# Altium footprint library S_S.PcbLib: 51 footprints (part 4 of 4)
Each footprint in its own frame and in the unit in brackets; x right, y up, seen from the top. Pads: shape width x height; smd on the part's side, far side on the other; paste and mask are expansions set on the pad; w line width, h text height; cw(c..) or ccw(c..) is an arc to the next point about the centre after c.
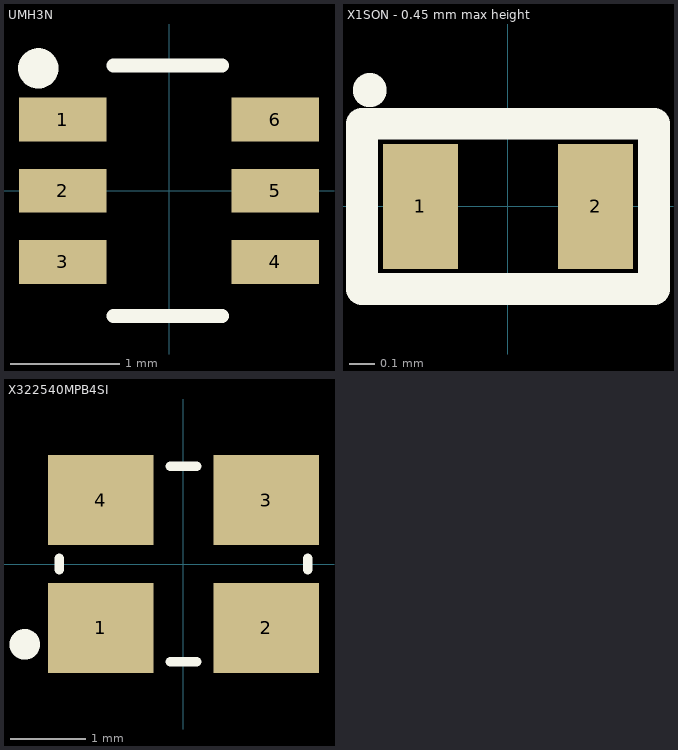
[diagram p3: the footprints below, top view; thin cyan lines are the x and y axes]

## UMH3N [mm]
pads (6):
  rect 0.8x0.4 smd: 1(-0.97,0.65) 2(-0.97,0) 3(-0.97,-0.65) 4(0.97,-0.65) 5(0.97,0) 6(0.97,0.65)
Top Overlay:
  circle w0.254: c-1.194,1.118 r0.057
  lines w0.127: -0.508,-1.143 0.483,-1.143 ; -0.508,1.143 0.483,1.143
3D body "User Library-SOT363-2.STEP": height 1.08, standoff -0.02, extent -1.2,-1.1 1.2,1.1

## X1SON - 0.45 mm max height [mm] "TVS 6A@80/20µs 14V 6V 5.5V@(MAX)"
pads (2):
  rect 0.3x0.5 smd: 1(-0.35,0) 2(0.35,0)
Top Overlay:
  circle w0.127: c-0.553,0.465 r0.004
  lines w0.127: -0.584,-0.33 -0.584,0.33 0.584,0.33 0.584,-0.33 -0.584,-0.33
3D body "TPD1E10B06DPYR.STEP": height 0.45, standoff 0, extent -0.5,-0.3 0.5,0.3

## X322540MPB4SI [mm]
pads (4):
  rect 1.4x1.2 smd: 1(-1.1,-0.85) 2(1.1,-0.85) 3(1.1,0.85) 4(-1.1,0.85)
Top Overlay:
  circle w0.254: c-2.108,-1.067 r0.076
  lines w0.127: -1.651,-0.076 -1.651,0.076 ; -0.178,-1.295 0.178,-1.295 ; -0.178,1.295 0.178,1.295 ; 1.651,-0.076 1.651,0.076
3D body "ABM8-24.000MHZ-R60-D-1-W-T.STEP": height 0.8, standoff 0, extent -1.6,-1.25 1.6,1.25